# Altium footprint library UJ20CVGSMTP16TR.PcbLib: 1 footprints
Each footprint in its own frame and in the unit in brackets; x right, y up, seen from the top. Pads: shape width x height; smd on the part's side, far side on the other; paste and mask are expansions set on the pad; w line width, h text height; cw(c..) or ccw(c..) is an arc to the next point about the centre after c.
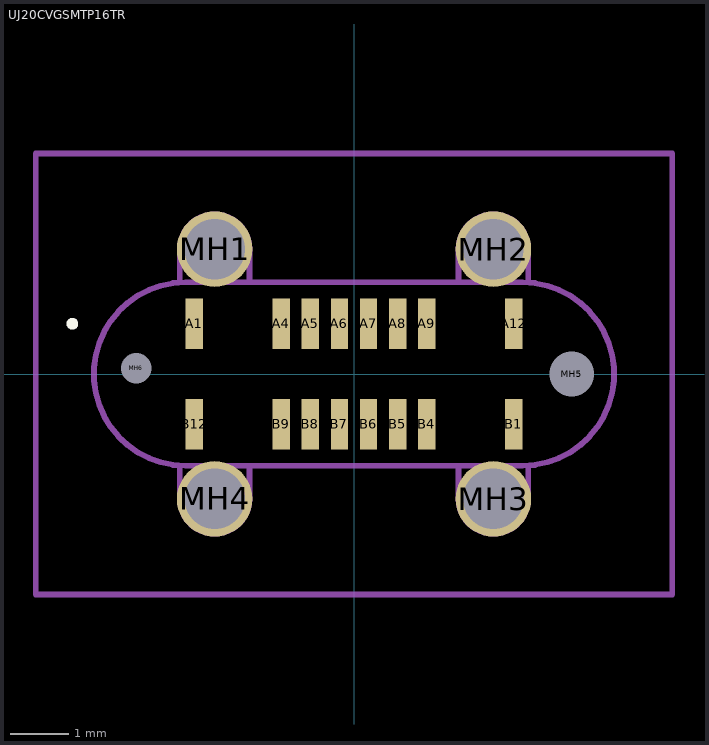
[diagram p0: the footprint, top view; thin cyan lines are the x and y axes]

## UJ20CVGSMTP16TR [mm]
pads (22):
  rect 0.3x0.87 smd: A1(-2.75,0.865) A4(-1.25,0.865) A5(-0.75,0.865) A6(-0.25,0.865) A7(0.25,0.865) A8(0.75,0.865) A9(1.25,0.865) A12(2.75,0.865) B1(2.75,-0.865) B4(1.25,-0.865) B5(0.75,-0.865) B6(0.25,-0.865) B7(-0.25,-0.865) B8(-0.75,-0.865) B9(-1.25,-0.865) B12(-2.75,-0.865)
  round 1.3 hole 1.04: MH1(-2.4,2.15) MH2(2.4,2.15) MH3(2.4,-2.15) MH4(-2.4,-2.15)
  round 0.385 hole 0.77 unplated: MH5(3.75,0)
  round 0.26 hole 0.52 unplated: MH6(-3.75,0.1)
Top Overlay:
  lines w0.1: -4.9,0.865 cw(c-4.85,0.865) -4.8,0.865 ; -4.9,0.865 -4.9,0.865 ; -4.9,0.865 ccw(c-4.85,0.865) -4.8,0.865 ; -4.8,0.865 -4.8,0.865
Mechanical 15:
  lines w0.1: -3,-1.58 -3,-2.15 ccw(c-2.4,-2.15) -1.8,-2.15 ; -3,1.58 -3,2.15 ; -1.8,-1.58 -1.8,-2.15 ; -1.8,1.58 -1.8,2.15 ccw(c-2.4,2.15) -3,2.15 ; 1.8,-1.58 1.8,-2.15 ccw(c2.4,-2.15) 3,-2.15 ; 1.8,1.58 1.8,2.15 cw(c2.4,2.15) 3,2.15 ; 3,-1.58 3,-2.15 ; 3,1.58 3,2.15 ; -3,2.15 -3,2.15 ; -2.9,-1.58 2.9,-1.58 ccw(c2.9,0) 2.9,1.58 ; -2.9,-1.58 -2.9,-1.58 ; -2.9,-1.58 cw(c-2.9,0) -2.9,1.58 0,1.58 2.9,1.58 ; -1.8,-2.15 -1.8,-2.15 ; 2.9,1.58 2.9,1.58 ; 3,-2.15 3,-2.15 ; 3,2.15 3,2.15
Mechanical 20:
  lines w0.1: -5.48,-3.8 5.48,-3.8 5.48,3.8 -5.48,3.8 -5.48,-3.8